# Altium footprint library SamacSys.PcbLib: 1008 footprints (part 57 of 63)
Each footprint in its own frame and in the unit in brackets; x right, y up, seen from the top. Pads: shape width x height; smd on the part's side, far side on the other; paste and mask are expansions set on the pad; w line width, h text height; cw(c..) or ccw(c..) is an arc to the next point about the centre after c.
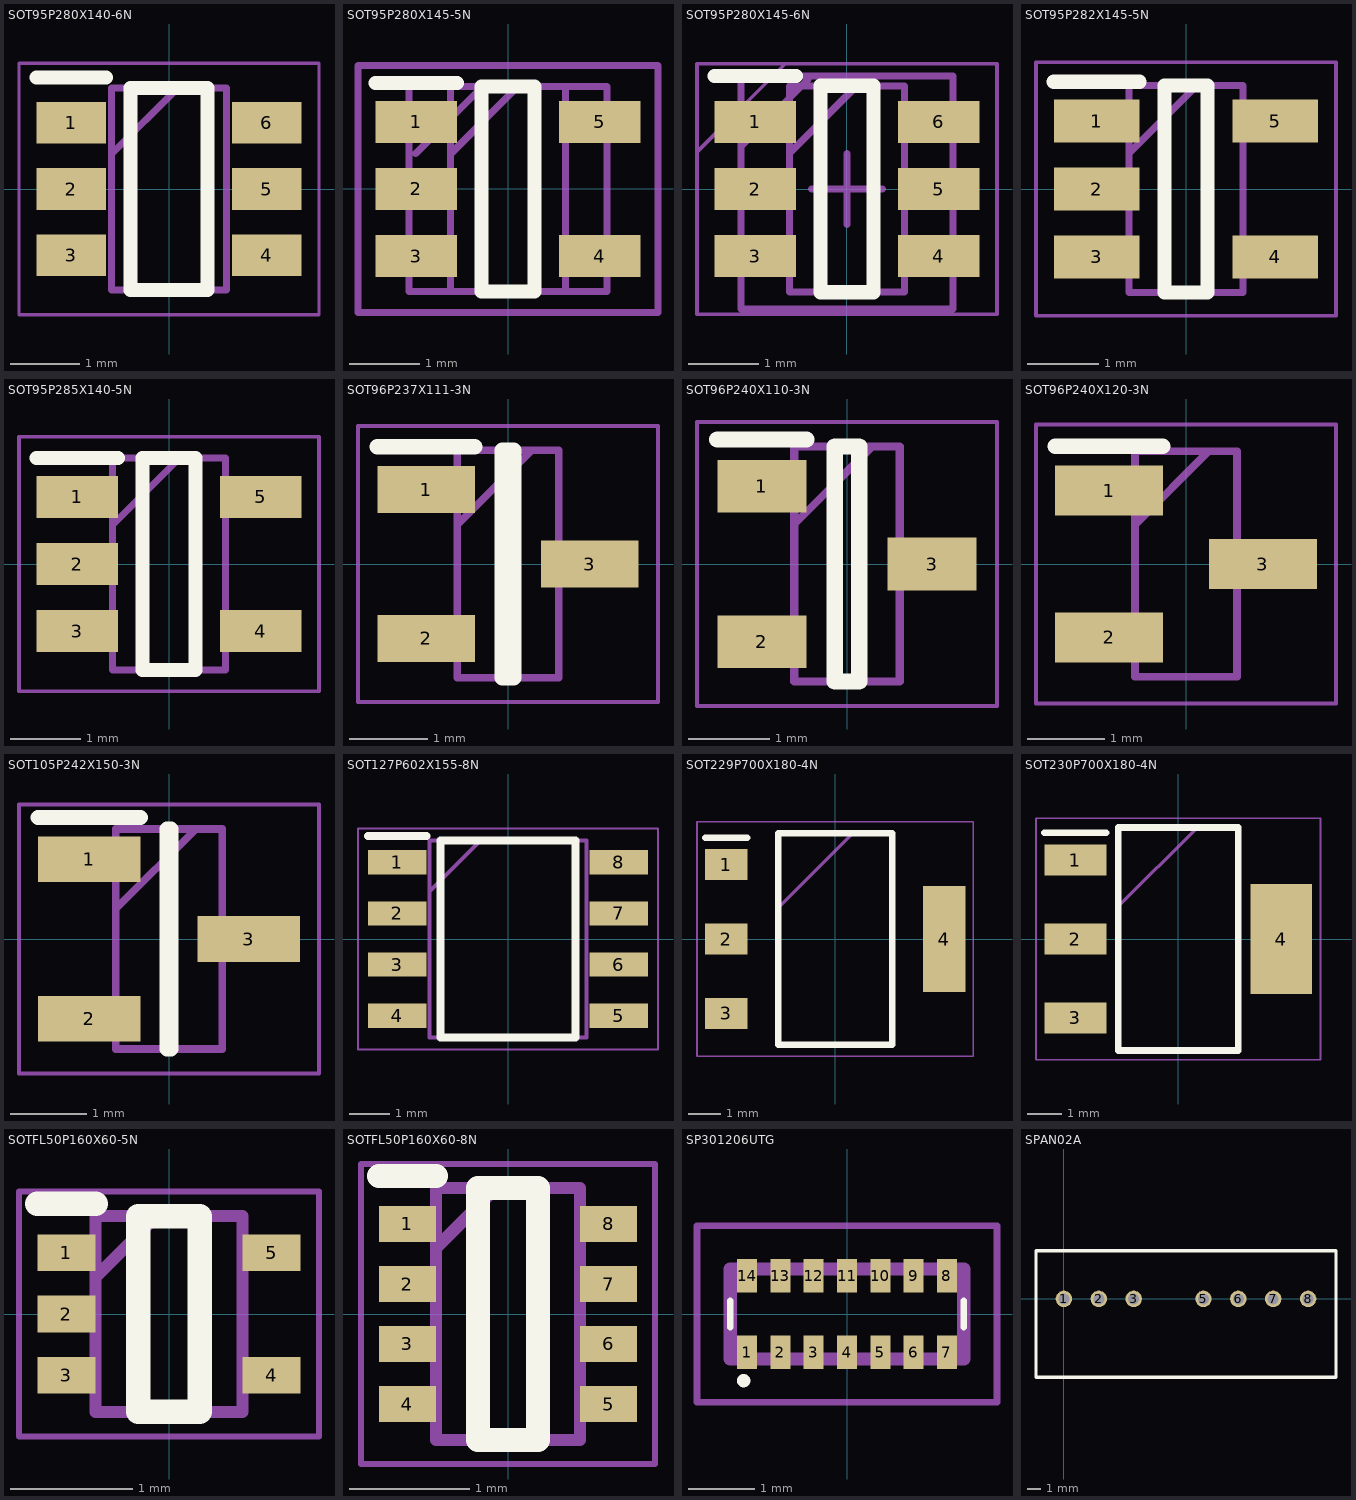
[diagram p56: the footprints below, top view; thin cyan lines are the x and y axes]

## SOT95P280X140-6N [mm]
pads (6):
  rect 1x0.6 smd: 1(-1.4,0.95) 2(-1.4,0) 3(-1.4,-0.95) 4(1.4,-0.95) 5(1.4,0) 6(1.4,0.95)
Top Overlay:
  lines w0.2: -1.9,1.6 -0.9,1.6 ; -0.55,-1.45 -0.55,1.45 0.55,1.45 0.55,-1.45 -0.55,-1.45
Assembly:
  lines w0.1: -0.825,0.5 0.125,1.45 ; -0.825,-1.45 -0.825,1.45 0.825,1.45 0.825,-1.45 -0.825,-1.45
Countryard:
  lines w0.05: -2.15,-1.8 -2.15,1.8 2.15,1.8 2.15,-1.8 -2.15,-1.8
3D body "BL8032CB6TR.stp": height 1.4, standoff 0, extent -1.4,-1.45 1.4,1.45

## SOT95P280X145-5N [mm]
pads (5):
  rect 1.15x0.6 smd: 1(-1.3,0.95) 2(-1.3,0) 3(-1.3,-0.95) 4(1.3,-0.95) 5(1.3,0.95)
Top Overlay:
  lines w0.2: -1.875,1.5 -0.725,1.5 ; -0.375,-1.45 -0.375,1.45 0.375,1.45 0.375,-1.45 -0.375,-1.45
Top Assembly:
  lines w0.1: -1.312,0.5 -0.362,1.45 ; -1.4,-1.45 -1.4,1.45 1.4,1.45 1.4,-1.45 -1.4,-1.45
Top Courtyard:
  lines w0.1: -2.125,-1.75 -2.125,1.75 2.125,1.75 2.125,-1.75 -2.125,-1.75
Assembly:
  lines w0.1: -0.812,0.5 0.138,1.45 ; -0.812,-1.45 -0.812,1.45 0.812,1.45 0.812,-1.45 -0.812,-1.45
Countryard:
  lines w0.1: -2.125,-1.75 2.125,-1.75 2.125,1.75 -2.125,1.75 -2.125,-1.75
3D body "STMPS2151STR.stp": height 1.45, standoff 0, extent -1.4,-1.45 1.4,1.45

## SOT95P280X145-6N [mm]
pads (6):
  rect 1.15x0.6 smd: 1(-1.3,0.95) 2(-1.3,0) 3(-1.3,-0.95) 4(1.3,-0.95) 5(1.3,0) 6(1.3,0.95)
Top Overlay:
  lines w0.2: -1.875,1.6 -0.725,1.6 ; -0.375,-1.462 -0.375,1.462 0.375,1.462 0.375,-1.462 -0.375,-1.462
Top Assembly:
  lines w0.1: -1.5,0.6 -0.55,1.55 ; -1.5,-1.7 -1.5,1.6 1.5,1.6 1.5,-1.7 -1.5,-1.7
Top Courtyard:
  lines w0.05: -2.125,0.5 -2.125,0.525 -0.875,1.775 ; -2.125,-1.775 -2.125,1.775 2.125,1.775 2.125,-1.775 -2.125,-1.775
Assembly:
  lines w0.1: -0.812,0.512 0.138,1.462 ; -0.5,0 0.5,0 ; 0,-0.5 0,0.5 ; -0.812,-1.462 -0.812,1.462 0.812,1.462 0.812,-1.462 -0.812,-1.462
Countryard:
  lines w0.05: -2.125,0.5 -2.125,0.525 -0.875,1.775 ; -2.125,-1.775 -2.125,1.775 2.125,1.775 2.125,-1.775 -2.125,-1.775
3D body "ESDA6V1BC6.stp": height 1.45, standoff 0, extent -1.4,-1.462 1.4,1.462

## SOT95P282X145-5N [mm]
pads (5):
  rect 1.2x0.6 smd: 1(-1.25,0.95) 2(-1.25,0) 3(-1.25,-0.95) 4(1.25,-0.95) 5(1.25,0.95)
Top Overlay:
  lines w0.2: -1.85,1.5 -0.65,1.5 ; -0.3,-1.45 -0.3,1.45 0.3,1.45 0.3,-1.45 -0.3,-1.45
Assembly:
  lines w0.1: -0.8,0.5 0.15,1.45 ; -0.8,-1.45 -0.8,1.45 0.8,1.45 0.8,-1.45 -0.8,-1.45
Countryard:
  lines w0.05: -2.1,-1.775 -2.1,1.775 2.1,1.775 2.1,-1.775 -2.1,-1.775
3D body "SN74LVC1G17DBVRE4.stp": height 1.45, standoff 0, extent -1.408,-1.45 1.408,1.45

## SOT95P285X140-5N [mm]
pads (5):
  rect 1.15x0.6 smd: 1(-1.3,0.95) 2(-1.3,0) 3(-1.3,-0.95) 4(1.3,-0.95) 5(1.3,0.95)
Top Overlay:
  lines w0.2: -1.875,1.5 -0.725,1.5 ; -0.375,-1.5 -0.375,1.5 0.375,1.5 0.375,-1.5 -0.375,-1.5
Assembly:
  lines w0.1: -0.8,0.55 0.15,1.5 ; -0.8,-1.5 -0.8,1.5 0.8,1.5 0.8,-1.5 -0.8,-1.5
Countryard:
  lines w0.05: -2.125,-1.8 -2.125,1.8 2.125,1.8 2.125,-1.8 -2.125,-1.8
3D body "74LVC1G07W5-7.stp": height 1.4, standoff 0, extent -1.425,-1.5 1.425,1.5

## SOT96P237X111-3N [mm]
pads (3):
  rect 1.25x0.6 smd: 1(-1.05,0.955) 2(-1.05,-0.955) 3(1.05,0)
Top Overlay:
  lines w0.2: -1.675,1.505 -0.425,1.505 ; -0.075,-1.46 0.075,-1.46 0.075,1.46 -0.075,1.46 -0.075,-1.46
Assembly:
  lines w0.1: -0.65,0.505 0.305,1.46 ; -0.65,-1.46 0.65,-1.46 0.65,1.46 -0.65,1.46 -0.65,-1.46
Countryard:
  lines w0.05: -1.925,-1.77 1.925,-1.77 1.925,1.77 -1.925,1.77 -1.925,-1.77
3D body "NUP1301ML3T1G.stp": height 1.11, standoff 0, extent -1.185,-1.46 1.185,1.46

## SOT96P240X110-3N [mm]
pads (3):
  rect 1.1x0.65 smd: 1(-1.05,0.96) 2(-1.05,-0.96) 3(1.05,0)
Top Overlay:
  lines w0.2: -1.6,1.535 -0.5,1.535 ; -0.15,-1.45 0.15,-1.45 0.15,1.45 -0.15,1.45 -0.15,-1.45
Assembly:
  lines w0.1: -0.65,0.49 0.31,1.45 ; -0.65,-1.45 0.65,-1.45 0.65,1.45 -0.65,1.45 -0.65,-1.45
Countryard:
  lines w0.05: -1.85,-1.75 1.85,-1.75 1.85,1.75 -1.85,1.75 -1.85,-1.75
3D body "BAS70-04-7-F.stp": height 1.1, standoff 0, extent -1.2,-1.45 1.2,1.45

## SOT96P240X120-3N [mm]
pads (3):
  rect 1.4x0.65 smd: 1(-1,0.955) 2(-1,-0.955) 3(1,0)
Top Overlay:
  lines w0.2: -1.7,1.53 -0.3,1.53
Assembly:
  lines w0.1: -0.662,0.51 0.292,1.465 ; -0.662,-1.465 -0.662,1.465 0.662,1.465 0.662,-1.465 -0.662,-1.465
Countryard:
  lines w0.05: -1.95,-1.815 -1.95,1.815 1.95,1.815 1.95,-1.815 -1.95,-1.815
3D body "HSMS-2812-TR1G.stp": height 1.2, standoff 0, extent -1.35,-1.565 1.35,1.565

## SOT105P242X150-3N [mm]
pads (3):
  rect 1.35x0.6 smd: 1(-1.05,1.05) 2(-1.05,-1.05) 3(1.05,0)
Top Overlay:
  lines w0.2: -1.725,1.6 -0.375,1.6 ; -0.025,-1.448 -0.025,1.448 0.025,1.448 0.025,-1.448 -0.025,-1.448
Assembly:
  lines w0.1: -0.7,0.398 0.35,1.448 ; -0.7,-1.448 -0.7,1.448 0.7,1.448 0.7,-1.448 -0.7,-1.448
Countryard:
  lines w0.05: -1.975,-1.77 -1.975,1.77 1.975,1.77 1.975,-1.77 -1.975,-1.77
3D body "BAR43AFILM.stp": height 1.5, standoff 0, extent -1.212,-1.448 1.212,1.448

## SOT127P602X155-8N [mm]
pads (8):
  rect 1.45x0.6 smd: 1(-2.75,1.905) 2(-2.75,0.635) 3(-2.75,-0.635) 4(-2.75,-1.905) 5(2.75,-1.905) 6(2.75,-0.635) 7(2.75,0.635) 8(2.75,1.905)
Top Overlay:
  lines w0.2: -3.475,2.555 -2.025,2.555 ; -1.675,-2.444 -1.675,2.444 1.675,2.444 1.675,-2.444 -1.675,-2.444
Assembly:
  lines w0.1: -1.949,1.174 -0.679,2.444 ; -1.949,-2.444 -1.949,2.444 1.949,2.444 1.949,-2.444 -1.949,-2.444
Countryard:
  lines w0.05: -3.725,-2.739 -3.725,2.739 3.725,2.739 3.725,-2.739 -3.725,-2.739
3D body "FM25V02A-G.stp": height 1.55, standoff 0, extent -3.01,-2.445 3.01,2.445

## SOT229P700X180-4N [mm]
pads (4):
  rect 1.3x0.95 smd: 1(-3.35,2.29) 2(-3.35,0) 3(-3.35,-2.29)
  rect 1.3x3.25 smd: 4(3.35,0)
Top Overlay:
  lines w0.2: -4,3.115 -2.7,3.115 ; -1.752,-3.252 -1.752,3.252 1.752,3.252 1.752,-3.252 -1.752,-3.252
Assembly:
  lines w0.1: -1.752,0.962 0.538,3.252 ; -1.752,-3.252 -1.752,3.252 1.752,3.252 1.752,-3.252 -1.752,-3.252
Countryard:
  lines w0.05: -4.25,-3.605 -4.25,3.605 4.25,3.605 4.25,-3.605 -4.25,-3.605
3D body "AMS1117-3.3.stp": height 1.8, standoff 0, extent -3.5,-3.253 3.5,3.253

## SOT230P700X180-4N [mm]
pads (4):
  rect 1.8x0.9 smd: 1(-3,2.3) 2(-3,0) 3(-3,-2.3)
  rect 1.8x3.2 smd: 4(3,0)
Top Overlay:
  lines w0.2: -3.9,3.1 -2.1,3.1 ; -1.75,-3.25 -1.75,3.25 1.75,3.25 1.75,-3.25 -1.75,-3.25
Assembly:
  lines w0.1: -1.75,0.95 0.55,3.25 ; -1.75,-3.25 -1.75,3.25 1.75,3.25 1.75,-3.25 -1.75,-3.25
Countryard:
  lines w0.05: -4.15,-3.525 -4.15,3.525 4.15,3.525 4.15,-3.525 -4.15,-3.525
3D body "DMP10H400SE-13.stp": height 1.8, standoff 0, extent -3.5,-3.25 3.5,3.25

## SOTFL50P160X60-5N [mm]
pads (5):
  rect 0.475x0.3 smd: 1(-0.838,0.5) 2(-0.838,0) 3(-0.838,-0.5) 4(0.838,-0.5) 5(0.838,0.5)
Top Overlay:
  lines w0.2: -1.075,0.9 -0.6,0.9 ; -0.25,-0.8 -0.25,0.8 0.25,0.8 0.25,-0.8 -0.25,-0.8
Assembly:
  lines w0.1: -0.6,0.3 -0.1,0.8 ; -0.6,-0.8 -0.6,0.8 0.6,0.8 0.6,-0.8 -0.6,-0.8
Countryard:
  lines w0.05: -1.225,-1 -1.225,1 1.225,1 1.225,-1 -1.225,-1
3D body "TPD3E001DRLR.stp": height 0.6, standoff 0, extent -0.8,-0.8 0.8,0.8

## SOTFL50P160X60-8N [mm]
pads (8):
  rect 0.475x0.3 smd: 1(-0.838,0.75) 2(-0.838,0.25) 3(-0.838,-0.25) 4(-0.838,-0.75) 5(0.838,-0.75) 6(0.838,-0.25) 7(0.838,0.25) 8(0.838,0.75)
Top Overlay:
  lines w0.2: -1.075,1.15 -0.6,1.15 ; -0.25,-1.05 -0.25,1.05 0.25,1.05 0.25,-1.05 -0.25,-1.05
Assembly:
  lines w0.1: -0.6,0.55 -0.1,1.05 ; -0.6,-1.05 -0.6,1.05 0.6,1.05 0.6,-1.05 -0.6,-1.05
Countryard:
  lines w0.05: -1.225,-1.25 -1.225,1.25 1.225,1.25 1.225,-1.25 -1.225,-1.25
3D body "TPS629206QDRLRQ1.stp": height 0.6, standoff 0, extent -0.8,-1.05 0.8,1.05

## SP301206UTG [mm]
pads (14):
  rect 0.3x0.5 smd: 1(-1.5,-0.575) 2(-1,-0.575) 3(-0.5,-0.575) 4(0,-0.575) 5(0.5,-0.575) 6(1,-0.575) 7(1.5,-0.575) 8(1.5,0.575) 9(1,0.575) 10(0.5,0.575) 11(0,0.575) 12(-0.5,0.575) 13(-1,0.575) 14(-1.5,0.575)
Top Overlay:
  lines w0.1: -1.75,-0.2 -1.75,0.2 ; 1.75,-0.2 1.75,0.2 ; -1.6,-1 cw(c-1.55,-1) -1.5,-1 cw(c-1.55,-1) -1.6,-1
Assembly:
  lines w0.2: -1.75,-0.675 -1.75,0.675 1.75,0.675 1.75,-0.675 -1.75,-0.675
Countryard:
  lines w0.1: -2.25,-1.325 -2.25,1.325 2.25,1.325 2.25,-1.325 -2.25,-1.325
3D body "SP3012-06UTG.stp": height 0.65, standoff 0, extent -1.75,-0.795 1.75,0.795

## SPAN02A [mm]
height 10.6
pads (7):
  round 1.2 hole 0.8: 1(0,0) 2(2.54,0) 3(5.08,0) 5(10.16,0) 6(12.7,0) 7(15.24,0) 8(17.78,0)
Top Overlay:
  lines w0.254: -2.032,-5.7 -2.032,3.5 19.812,3.5 19.812,-5.7 -2.032,-5.7
Top Designator:
  text ".Designator" at 1.272,-1.905 h1.52
3D body "SIP-8.step": height 11.1, standoff -3.6, extent -2,-5.7 19.8,3.5